# Altium schematic symbol library WR-TBL_Pluggable Connector.SchLib: 879 symbols (part 10 of 15)
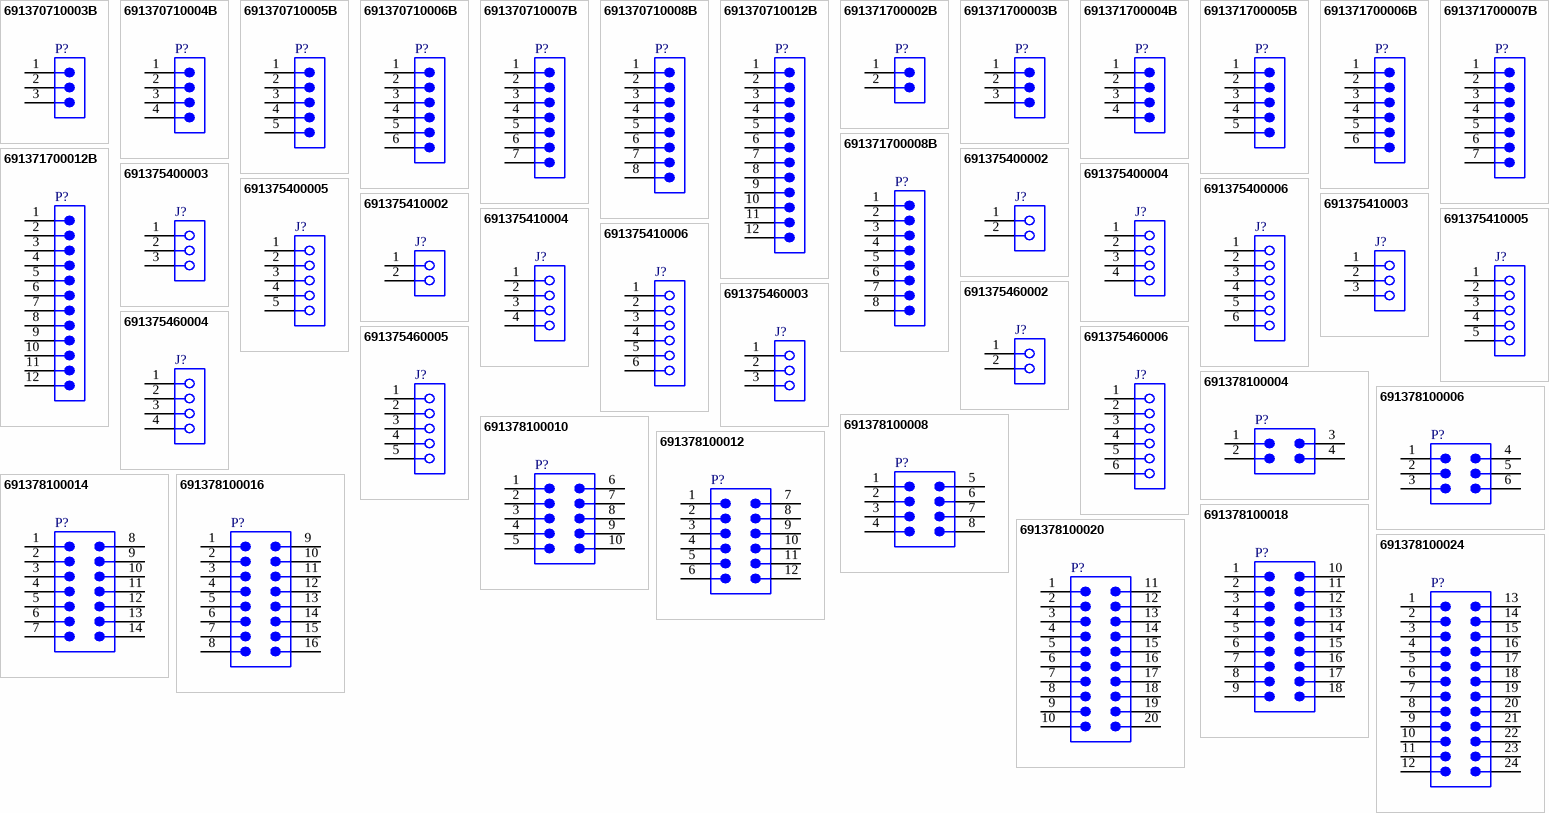
[diagram p30: symbols 691370710003B to 691378100024]

## 691371700007B
designator P?  (value not drawn)
WR-TBL Series 371B Vertical PCB Header, THT, pitch 5mm, 07p; Manufacturer: Wurth Elektronik; Modularity: No; Rated Current: 16A; Working Voltage: 300V (AC); Manufacturer Part Number: 691371700007B; Product Series: WR-TBL; ComponentLink1Description: Website Link; ComponentLink1URL: https://www.we-online.com; ComponentLink2Description: Datasheet Link; ComponentLink2URL: https://www.we-online.com/components/products/datasheet/691371700007B; Mount: Through Hole; Operating Temperature Min: -40degC; Operating Temperature Max: 105degC; Packaging: Box; Application: Pluggable; Number of Pins: 7; Number of Rows: 1; Orientation: Vertical; Lead Pitch: 5mm
footprint 691371700007B
pins: 1, 2, 3, 4, 5, 6, 7

## 691371700008B
designator P?  (value not drawn)
WR-TBL Series 371B Vertical PCB Header, THT, pitch 5mm, 08p; Manufacturer: Wurth Elektronik; Modularity: No; Rated Current: 16A; Working Voltage: 300V (AC); Manufacturer Part Number: 691371700008B; Product Series: WR-TBL; ComponentLink1Description: Website Link; ComponentLink1URL: https://www.we-online.com; ComponentLink2Description: Datasheet Link; ComponentLink2URL: https://www.we-online.com/components/products/datasheet/691371700008B; Mount: Through Hole; Operating Temperature Min: -40degC; Operating Temperature Max: 105degC; Packaging: Box; Application: Pluggable; Number of Pins: 8; Number of Rows: 1; Orientation: Vertical; Lead Pitch: 5mm
footprint 691371700008B
pins: 1, 2, 3, 4, 5, 6, 7, 8

## 691371700012B
designator P?  (value not drawn)
WR-TBL Series 371B Vertical PCB Header, THT, pitch 5mm, 12p; Manufacturer: Wurth Elektronik; Modularity: No; Rated Current: 16A; Working Voltage: 300V (AC); Manufacturer Part Number: 691371700012B; Product Series: WR-TBL; ComponentLink1Description: Website Link; ComponentLink1URL: https://www.we-online.com; ComponentLink2Description: Datasheet Link; ComponentLink2URL: https://www.we-online.com/components/products/datasheet/691371700012B; Mount: Through Hole; Operating Temperature Min: -40degC; Operating Temperature Max: 105degC; Packaging: Box; Application: Pluggable; Number of Pins: 12; Number of Rows: 1; Orientation: Vertical; Lead Pitch: 5mm
footprint 691371700012B
pins: 1, 2, 3, 4, 5, 6, 7, 8, 9, 10, 11, 12

## 691375400002
designator J?  (value not drawn)
WR-TBL Series 3754 PCB Header Vertical cable entry, THT, pitch 7.62mm, 02p; Manufacturer: Wurth Elektronik; Modularity: No; Manufacturer Part Number: 691375400002; Product Series: WR-TBL; ComponentLink1Description: Website Link; ComponentLink1URL: https://www.we-online.com; ComponentLink2Description: Datasheet Link; ComponentLink2URL: https://www.we-online.com/components/products/datasheet/691375400002; Mount: Through Hole; Operating Temperature Min: -30degC; Operating Temperature Max: 160degC; Packaging: Carton; Application: PCB Header; Number of Pins: 2; Number of Rows: 1; Orientation: Vertical Cable Entry; Lead Pitch: 7.62mm
footprint 691375400002
pins: 1, 2

## 691375400003
designator J?  (value not drawn)
WR-TBL Series 3754 PCB Header Vertical cable entry, THT, pitch 7.62mm, 03p; Manufacturer: Wurth Elektronik; Modularity: No; Manufacturer Part Number: 691375400003; Product Series: WR-TBL; ComponentLink1Description: Website Link; ComponentLink1URL: https://www.we-online.com; ComponentLink2Description: Datasheet Link; ComponentLink2URL: https://www.we-online.com/components/products/datasheet/691375400003; Mount: Through Hole; Operating Temperature Min: -30degC; Operating Temperature Max: 160degC; Packaging: Carton; Application: PCB Header; Number of Pins: 3; Number of Rows: 1; Orientation: Vertical Cable Entry; Lead Pitch: 7.62mm
footprint 691375400003
pins: 1, 2, 3

## 691375400004
designator J?  (value not drawn)
WR-TBL Series 3754 PCB Header Vertical cable entry, THT, pitch 7.62mm, 04p; Manufacturer: Wurth Elektronik; Modularity: No; Manufacturer Part Number: 691375400004; Product Series: WR-TBL; ComponentLink1Description: Website Link; ComponentLink1URL: https://www.we-online.com; ComponentLink2Description: Datasheet Link; ComponentLink2URL: https://www.we-online.com/components/products/datasheet/691375400004; Mount: Through Hole; Operating Temperature Min: -30degC; Operating Temperature Max: 160degC; Packaging: Carton; Application: PCB Header; Number of Pins: 4; Number of Rows: 1; Orientation: Vertical Cable Entry; Lead Pitch: 7.62mm
footprint 691375400004
pins: 1, 2, 3, 4

## 691375400005
designator J?  (value not drawn)
WR-TBL Series 3754 PCB Header Vertical cable entry, THT, pitch 7.62mm, 05p; Manufacturer: Wurth Elektronik; Modularity: No; Manufacturer Part Number: 691375400005; Product Series: WR-TBL; ComponentLink1Description: Website Link; ComponentLink1URL: https://www.we-online.com; ComponentLink2Description: Datasheet Link; ComponentLink2URL: https://www.we-online.com/components/products/datasheet/691375400005; Mount: Through Hole; Operating Temperature Min: -30degC; Operating Temperature Max: 160degC; Packaging: Carton; Application: PCB Header; Number of Pins: 5; Number of Rows: 1; Orientation: Vertical Cable Entry; Lead Pitch: 7.62mm
footprint 691375400005
pins: 1, 2, 3, 4, 5

## 691375400006
designator J?  (value not drawn)
WR-TBL Series 3754 PCB Header Vertical cable entry, THT, pitch 7.62mm, 06p; Manufacturer: Wurth Elektronik; Modularity: No; Manufacturer Part Number: 691375400006; Product Series: WR-TBL; ComponentLink1Description: Website Link; ComponentLink1URL: https://www.we-online.com; ComponentLink2Description: Datasheet Link; ComponentLink2URL: https://www.we-online.com/components/products/datasheet/691375400006; Mount: Through Hole; Operating Temperature Min: -30degC; Operating Temperature Max: 160degC; Packaging: Carton; Application: PCB Header; Number of Pins: 6; Number of Rows: 1; Orientation: Vertical Cable Entry; Lead Pitch: 7.62mm
footprint 691375400006
pins: 1, 2, 3, 4, 5, 6

## 691375410002
designator J?  (value not drawn)
WR-TBL Series 3754 PCB Header Horizontal cable entry, THT, pitch 7.62mm, 02p; Manufacturer: Wurth Elektronik; Modularity: No; Manufacturer Part Number: 691375410002; Product Series: WR-TBL; ComponentLink1Description: Website Link; ComponentLink1URL: https://www.we-online.com; ComponentLink2Description: Datasheet Link; ComponentLink2URL: https://www.we-online.com/components/products/datasheet/691375410002; Mount: Through Hole; Operating Temperature Min: -30degC; Operating Temperature Max: 160degC; Packaging: Carton; Application: PCB Header; Number of Pins: 2; Number of Rows: 1; Orientation: Horizontal Cable Entry; Lead Pitch: 7.62mm
footprint 691375410002
pins: 1, 2

## 691375410003
designator J?  (value not drawn)
WR-TBL Series 3754 PCB Header Horizontal cable entry, THT, pitch 7.62mm, 03p; Manufacturer: Wurth Elektronik; Modularity: No; Manufacturer Part Number: 691375410003; Product Series: WR-TBL; ComponentLink1Description: Website Link; ComponentLink1URL: https://www.we-online.com; ComponentLink2Description: Datasheet Link; ComponentLink2URL: https://www.we-online.com/components/products/datasheet/691375410003; Mount: Through Hole; Operating Temperature Min: -30degC; Operating Temperature Max: 160degC; Packaging: Carton; Application: PCB Header; Number of Pins: 3; Number of Rows: 1; Orientation: Horizontal Cable Entry; Lead Pitch: 7.62mm
footprint 691375410003
pins: 1, 2, 3

## 691375410004
designator J?  (value not drawn)
WR-TBL Series 3754 PCB Header Horizontal cable entry, THT, pitch 7.62mm, 04p; Manufacturer: Wurth Elektronik; Modularity: No; Manufacturer Part Number: 691375410004; Product Series: WR-TBL; ComponentLink1Description: Website Link; ComponentLink1URL: https://www.we-online.com; ComponentLink2Description: Datasheet Link; ComponentLink2URL: https://www.we-online.com/components/products/datasheet/691375410004; Mount: Through Hole; Operating Temperature Min: -30degC; Operating Temperature Max: 160degC; Packaging: Carton; Application: PCB Header; Number of Pins: 4; Number of Rows: 1; Orientation: Horizontal Cable Entry; Lead Pitch: 7.62mm
footprint 691375410004
pins: 1, 2, 3, 4

## 691375410005
designator J?  (value not drawn)
WR-TBL Series 3754 PCB Header Horizontal cable entry, THT, pitch 7.62mm, 05p; Manufacturer: Wurth Elektronik; Modularity: No; Manufacturer Part Number: 691375410005; Product Series: WR-TBL; ComponentLink1Description: Website Link; ComponentLink1URL: https://www.we-online.com; ComponentLink2Description: Datasheet Link; ComponentLink2URL: https://www.we-online.com/components/products/datasheet/691375410005; Mount: Through Hole; Operating Temperature Min: -30degC; Operating Temperature Max: 160degC; Packaging: Carton; Application: PCB Header; Number of Pins: 5; Number of Rows: 1; Orientation: Horizontal Cable Entry; Lead Pitch: 7.62mm
footprint 691375410005
pins: 1, 2, 3, 4, 5

## 691375410006
designator J?  (value not drawn)
WR-TBL Series 3754 PCB Header Horizontal cable entry, THT, pitch 7.62mm, 06p; Manufacturer: Wurth Elektronik; Modularity: No; Manufacturer Part Number: 691375410006; Product Series: WR-TBL; ComponentLink1Description: Website Link; ComponentLink1URL: https://www.we-online.com; ComponentLink2Description: Datasheet Link; ComponentLink2URL: https://www.we-online.com/components/products/datasheet/691375410006; Mount: Through Hole; Operating Temperature Min: -30degC; Operating Temperature Max: 160degC; Packaging: Carton; Application: PCB Header; Number of Pins: 6; Number of Rows: 1; Orientation: Horizontal Cable Entry; Lead Pitch: 7.62mm
footprint 691375410006
pins: 1, 2, 3, 4, 5, 6

## 691375460002
designator J?  (value not drawn)
WR-TBL Series 3754 PCB Header Upsidedown Horizontal cable entry, THT, pitch 7.62mm, 02p; Manufacturer: Wurth Elektronik; Modularity: No; Manufacturer Part Number: 691375460002; Product Series: WR-TBL; ComponentLink1Description: Website Link; ComponentLink1URL: https://www.we-online.com; ComponentLink2Description: Datasheet Link; ComponentLink2URL: https://www.we-online.com/components/products/datasheet/691375460002; Mount: Through Hole; Operating Temperature Min: -30degC; Operating Temperature Max: 160degC; Packaging: Carton; Application: PCB Header; Number of Pins: 2; Number of Rows: 1; Orientation: Horizontal Cable Entry; Lead Pitch: 7.62mm
footprint 691375460002
pins: 1, 2

## 691375460003
designator J?  (value not drawn)
WR-TBL Series 3754 PCB Header Upsidedown Horizontal cable entry, THT, pitch 7.62mm, 03p; Manufacturer: Wurth Elektronik; Modularity: No; Manufacturer Part Number: 691375460003; Product Series: WR-TBL; ComponentLink1Description: Website Link; ComponentLink1URL: https://www.we-online.com; ComponentLink2Description: Datasheet Link; ComponentLink2URL: https://www.we-online.com/components/products/datasheet/691375460003; Mount: Through Hole; Operating Temperature Min: -30degC; Operating Temperature Max: 160degC; Packaging: Carton; Application: PCB Header; Number of Pins: 3; Number of Rows: 1; Orientation: Horizontal Cable Entry; Lead Pitch: 7.62mm
footprint 691375460003
pins: 1, 2, 3

## 691375460004
designator J?  (value not drawn)
WR-TBL Series 3754 PCB Header Upsidedown Horizontal cable entry, THT, pitch 7.62mm, 04p; Manufacturer: Wurth Elektronik; Modularity: No; Manufacturer Part Number: 691375460004; Product Series: WR-TBL; ComponentLink1Description: Website Link; ComponentLink1URL: https://www.we-online.com; ComponentLink2Description: Datasheet Link; ComponentLink2URL: https://www.we-online.com/components/products/datasheet/691375460004; Mount: Through Hole; Operating Temperature Min: -30degC; Operating Temperature Max: 160degC; Packaging: Carton; Application: PCB Header; Number of Pins: 4; Number of Rows: 1; Orientation: Horizontal Cable Entry; Lead Pitch: 7.62mm
footprint 691375460004
pins: 1, 2, 3, 4

## 691375460005
designator J?  (value not drawn)
WR-TBL Series 3754 PCB Header Upsidedown Horizontal cable entry, THT, pitch 7.62mm, 05p; Manufacturer: Wurth Elektronik; Modularity: No; Manufacturer Part Number: 691375460005; Product Series: WR-TBL; ComponentLink1Description: Website Link; ComponentLink1URL: https://www.we-online.com; ComponentLink2Description: Datasheet Link; ComponentLink2URL: https://www.we-online.com/components/products/datasheet/691375460005; Mount: Through Hole; Operating Temperature Min: -30degC; Operating Temperature Max: 160degC; Packaging: Carton; Application: PCB Header; Number of Pins: 5; Number of Rows: 1; Orientation: Horizontal Cable Entry; Lead Pitch: 7.62mm
footprint 691375460005
pins: 1, 2, 3, 4, 5

## 691375460006
designator J?  (value not drawn)
WR-TBL Series 3754 PCB Header Upsidedown Horizontal cable entry, THT, pitch 7.62mm, 06p; Manufacturer: Wurth Elektronik; Modularity: No; Manufacturer Part Number: 691375460006; Product Series: WR-TBL; ComponentLink1Description: Website Link; ComponentLink1URL: https://www.we-online.com; ComponentLink2Description: Datasheet Link; ComponentLink2URL: https://www.we-online.com/components/products/datasheet/691375460006; Mount: Through Hole; Operating Temperature Min: -30degC; Operating Temperature Max: 160degC; Packaging: Carton; Application: PCB Header; Number of Pins: 6; Number of Rows: 1; Orientation: Horizontal Cable Entry; Lead Pitch: 7.62mm
footprint 691375460006
pins: 1, 2, 3, 4, 5, 6

## 691378100004
designator P?  (value not drawn)
WR-TBL Series 3781 PCB Header Dual Row Vertical, THT, pitch 3.5mm, 04p; Manufacturer: Wurth Elektronik; Insulator Material: PA66; Rated Current: 8A; Working Voltage: 300V (AC); Withstanding Voltage: 1600V (AC); Manufacturer Part Number: 691378100004; Product Series: WR-TBL; ComponentLink1Description: Website Link; ComponentLink1URL: https://www.we-online.com; ComponentLink2Description: Datasheet Link; ComponentLink2URL: https://www.we-online.com/components/products/datasheet/691378100004; Mount: Through Hole; Operating Temperature Min: -40degC; Operating Temperature Max: 115degC; Packaging: Carton; Application: Pluggable; Number of Pins: 4; Number of Rows: 2; Orientation: Vertical; Lead Pitch: 3.5mm
footprint 691378100004
pins: 1, 2, 3, 4

## 691378100006
designator P?  (value not drawn)
WR-TBL Series 3781 PCB Header Dual Row Vertical, THT, pitch 3.5mm, 06p; Manufacturer: Wurth Elektronik; Insulator Material: PA66; Rated Current: 8A; Working Voltage: 300V (AC); Withstanding Voltage: 1600V (AC); Manufacturer Part Number: 691378100006; Product Series: WR-TBL; ComponentLink1Description: Website Link; ComponentLink1URL: https://www.we-online.com; ComponentLink2Description: Datasheet Link; ComponentLink2URL: https://www.we-online.com/components/products/datasheet/691378100006; Mount: Through Hole; Operating Temperature Min: -40degC; Operating Temperature Max: 115degC; Packaging: Carton; Application: Pluggable; Number of Pins: 6; Number of Rows: 2; Orientation: Vertical; Lead Pitch: 3.5mm
footprint 691378100006
pins: 1, 2, 3, 4, 5, 6

## 691378100008
designator P?  (value not drawn)
WR-TBL Series 3781 PCB Header Dual Row Vertical, THT, pitch 3.5mm, 08p; Manufacturer: Wurth Elektronik; Insulator Material: PA66; Rated Current: 8A; Working Voltage: 300V (AC); Withstanding Voltage: 1600V (AC); Manufacturer Part Number: 691378100008; Product Series: WR-TBL; ComponentLink1Description: Website Link; ComponentLink1URL: https://www.we-online.com; ComponentLink2Description: Datasheet Link; ComponentLink2URL: https://www.we-online.com/components/products/datasheet/691378100008; Mount: Through Hole; Operating Temperature Min: -40degC; Operating Temperature Max: 115degC; Packaging: Carton; Application: Pluggable; Number of Pins: 8; Number of Rows: 2; Orientation: Vertical; Lead Pitch: 3.5mm
footprint 691378100008
pins: 1, 2, 3, 4, 5, 6, 7, 8

## 691378100010
designator P?  (value not drawn)
WR-TBL Series 3781 PCB Header Dual Row Vertical, THT, pitch 3.5mm, 10p; Manufacturer: Wurth Elektronik; Insulator Material: PA66; Rated Current: 8A; Working Voltage: 300V (AC); Withstanding Voltage: 1600V (AC); Manufacturer Part Number: 691378100010; Product Series: WR-TBL; ComponentLink1Description: Website Link; ComponentLink1URL: https://www.we-online.com; ComponentLink2Description: Datasheet Link; ComponentLink2URL: https://www.we-online.com/components/products/datasheet/691378100010; Mount: Through Hole; Operating Temperature Min: -40degC; Operating Temperature Max: 115degC; Packaging: Carton; Application: Pluggable; Number of Pins: 10; Number of Rows: 2; Orientation: Vertical; Lead Pitch: 3.5mm
footprint 691378100010
pins: 1, 2, 3, 4, 5, 6, 7, 8, 9, 10

## 691378100012
designator P?  (value not drawn)
WR-TBL Series 3781 PCB Header Dual Row Vertical, THT, pitch 3.5mm, 12p; Manufacturer: Wurth Elektronik; Insulator Material: PA66; Rated Current: 8A; Working Voltage: 300V (AC); Withstanding Voltage: 1600V (AC); Manufacturer Part Number: 691378100012; Product Series: WR-TBL; ComponentLink1Description: Website Link; ComponentLink1URL: https://www.we-online.com; ComponentLink2Description: Datasheet Link; ComponentLink2URL: https://www.we-online.com/components/products/datasheet/691378100012; Mount: Through Hole; Operating Temperature Min: -40degC; Operating Temperature Max: 115degC; Packaging: Carton; Application: Pluggable; Number of Pins: 12; Number of Rows: 2; Orientation: Vertical; Lead Pitch: 3.5mm
footprint 691378100012
pins: 1, 2, 3, 4, 5, 6, 7, 8, 9, 10, 11, 12

## 691378100014
designator P?  (value not drawn)
WR-TBL Series 3781 PCB Header Dual Row Vertical, THT, pitch 3.5mm, 14p; Manufacturer: Wurth Elektronik; Insulator Material: PA66; Rated Current: 8A; Working Voltage: 300V (AC); Withstanding Voltage: 1600V (AC); Manufacturer Part Number: 691378100014; Product Series: WR-TBL; ComponentLink1Description: Website Link; ComponentLink1URL: https://www.we-online.com; ComponentLink2Description: Datasheet Link; ComponentLink2URL: https://www.we-online.com/components/products/datasheet/691378100014; Mount: Through Hole; Operating Temperature Min: -40degC; Operating Temperature Max: 115degC; Packaging: Carton; Application: Pluggable; Number of Pins: 14; Number of Rows: 2; Orientation: Vertical; Lead Pitch: 3.5mm
footprint 691378100014
pins: 1, 2, 3, 4, 5, 6, 7, 8, 9, 10, 11, 12, 13, 14

## 691378100016
designator P?  (value not drawn)
WR-TBL Series 3781 PCB Header Dual Row Vertical, THT, pitch 3.5mm, 16p; Manufacturer: Wurth Elektronik; Insulator Material: PA66; Rated Current: 8A; Working Voltage: 300V (AC); Withstanding Voltage: 1600V (AC); Manufacturer Part Number: 691378100016; Product Series: WR-TBL; ComponentLink1Description: Website Link; ComponentLink1URL: https://www.we-online.com; ComponentLink2Description: Datasheet Link; ComponentLink2URL: https://www.we-online.com/components/products/datasheet/691378100016; Mount: Through Hole; Operating Temperature Min: -40degC; Operating Temperature Max: 115degC; Packaging: Carton; Application: Pluggable; Number of Pins: 16; Number of Rows: 2; Orientation: Vertical; Lead Pitch: 3.5mm
footprint 691378100016
pins: 1, 2, 3, 4, 5, 6, 7, 8, 9, 10, 11, 12, 13, 14, 15, 16

## 691378100018
designator P?  (value not drawn)
WR-TBL Series 3781 PCB Header Dual Row Vertical, THT, pitch 3.5mm, 18p; Manufacturer: Wurth Elektronik; Insulator Material: PA66; Rated Current: 8A; Working Voltage: 300V (AC); Withstanding Voltage: 1600V (AC); Manufacturer Part Number: 691378100018; Product Series: WR-TBL; ComponentLink1Description: Website Link; ComponentLink1URL: https://www.we-online.com; ComponentLink2Description: Datasheet Link; ComponentLink2URL: https://www.we-online.com/components/products/datasheet/691378100018; Mount: Through Hole; Operating Temperature Min: -40degC; Operating Temperature Max: 115degC; Packaging: Carton; Application: Pluggable; Number of Pins: 18; Number of Rows: 2; Orientation: Vertical; Lead Pitch: 3.5mm
footprint 691378100018
pins: 1, 2, 3, 4, 5, 6, 7, 8, 9, 10, 11, 12, 13, 14, 15, 16, 17, 18

## 691378100020
designator P?  (value not drawn)
WR-TBL Series 3781 PCB Header Dual Row Vertical, THT, pitch 3.5mm, 20p; Manufacturer: Wurth Elektronik; Insulator Material: PA66; Rated Current: 8A; Working Voltage: 300V (AC); Withstanding Voltage: 1600V (AC); Manufacturer Part Number: 691378100020; Product Series: WR-TBL; ComponentLink1Description: Website Link; ComponentLink1URL: https://www.we-online.com; ComponentLink2Description: Datasheet Link; ComponentLink2URL: https://www.we-online.com/components/products/datasheet/691378100020; Mount: Through Hole; Operating Temperature Min: -40degC; Operating Temperature Max: 115degC; Packaging: Carton; Application: Pluggable; Number of Pins: 20; Number of Rows: 2; Orientation: Vertical; Lead Pitch: 3.5mm
footprint 691378100020
pins: 1, 2, 3, 4, 5, 6, 7, 8, 9, 10, 11, 12, 13, 14, 15, 16, 17, 18, 19, 20

## 691378100024
designator P?  (value not drawn)
WR-TBL Series 3781 PCB Header Dual Row Vertical, THT, pitch 3.5mm, 24p; Manufacturer: Wurth Elektronik; Insulator Material: PA66; Rated Current: 8A; Working Voltage: 300V (AC); Withstanding Voltage: 1600V (AC); Manufacturer Part Number: 691378100024; Product Series: WR-TBL; ComponentLink1Description: Website Link; ComponentLink1URL: https://www.we-online.com; ComponentLink2Description: Datasheet Link; ComponentLink2URL: https://www.we-online.com/components/products/datasheet/691378100024; Mount: Through Hole; Operating Temperature Min: -40degC; Operating Temperature Max: 115degC; Packaging: Carton; Application: Pluggable; Number of Pins: 24; Number of Rows: 2; Orientation: Vertical; Lead Pitch: 3.5mm
footprint 691378100024
pins: 1, 2, 3, 4, 5, 6, 7, 8, 9, 10, 11, 12, 13, 14, 15, 16, 17, 18, 19, 20, 21, 22, 23, 24

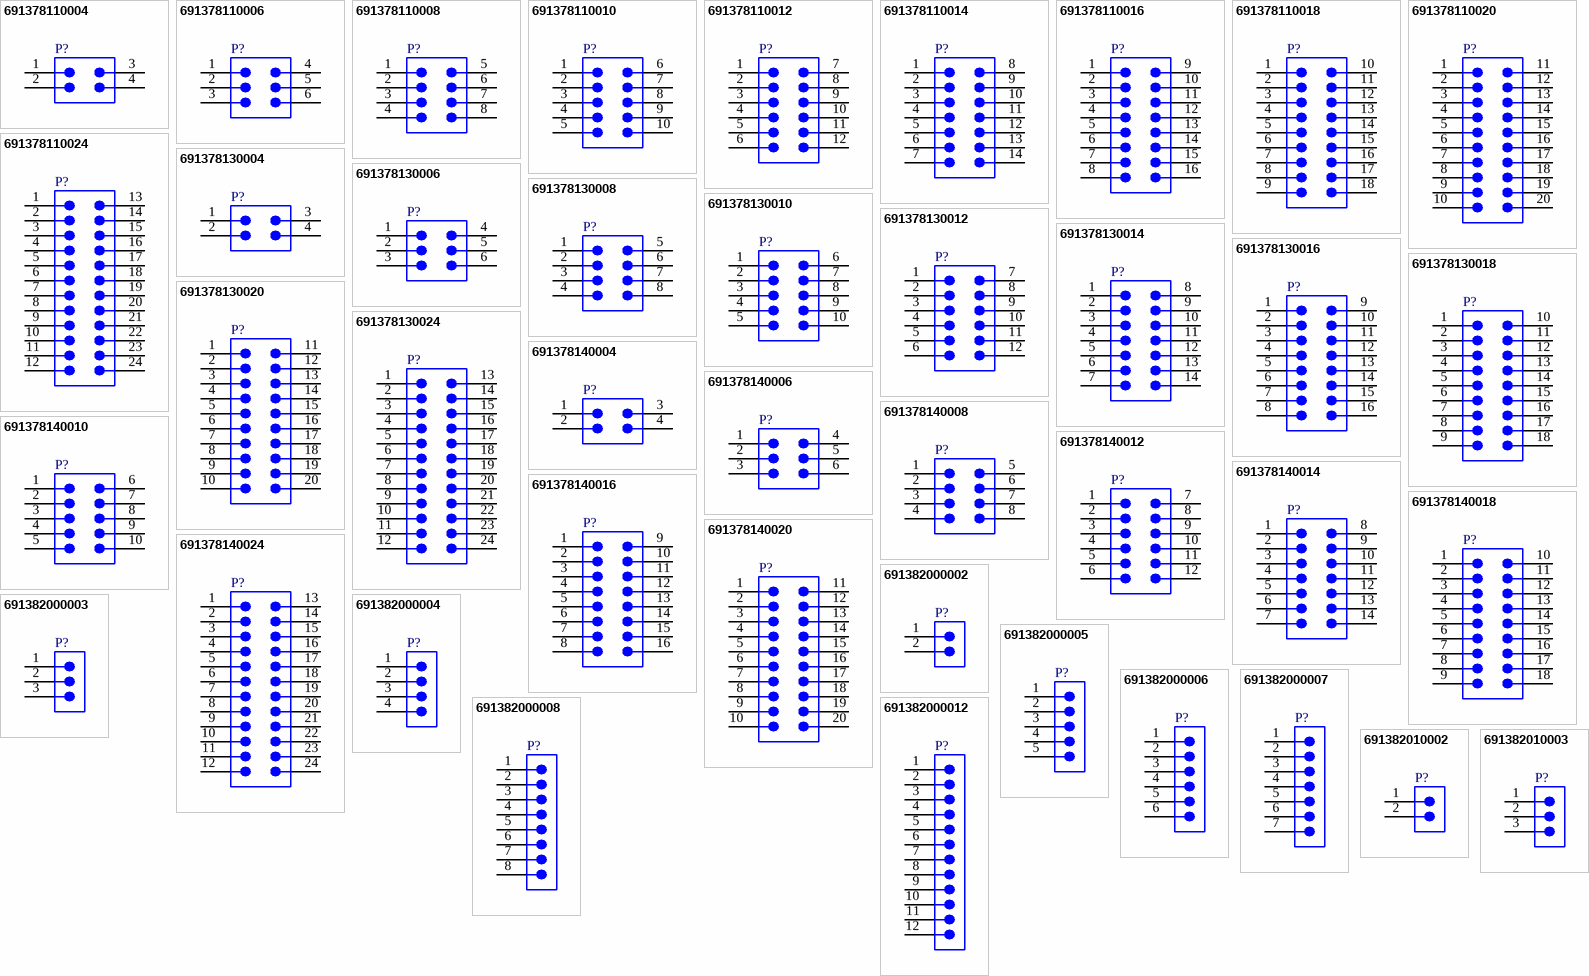
[diagram p15: symbols 691378110004 to 691382010003]

## 691378110004
designator P?  (value not drawn)
WR-TBL Series 3781 PCB Header Dual Row Horizontal, THT, pitch 3.5mm, 04p; Manufacturer: Wurth Elektronik; Insulator Material: PA66; Rated Current: 8A; Working Voltage: 150V (AC); Withstanding Voltage: 1300V (AC); Manufacturer Part Number: 691378110004; Product Series: WR-TBL; ComponentLink1Description: Website Link; ComponentLink1URL: https://www.we-online.com; ComponentLink2Description: Datasheet Link; ComponentLink2URL: https://www.we-online.com/components/products/datasheet/691378110004; Mount: Through Hole; Operating Temperature Min: -40degC; Operating Temperature Max: 115degC; Packaging: Carton; Application: Pluggable; Number of Pins: 4; Number of Rows: 2; Orientation: Horizontal; Lead Pitch: 3.5mm
footprint 691378110004
pins: 1, 2, 3, 4

## 691378110006
designator P?  (value not drawn)
WR-TBL Series 3781 PCB Header Dual Row Horizontal, THT, pitch 3.5mm, 06p; Manufacturer: Wurth Elektronik; Insulator Material: PA66; Rated Current: 8A; Working Voltage: 150V (AC); Withstanding Voltage: 1300V (AC); Manufacturer Part Number: 691378110006; Product Series: WR-TBL; ComponentLink1Description: Website Link; ComponentLink1URL: https://www.we-online.com; ComponentLink2Description: Datasheet Link; ComponentLink2URL: https://www.we-online.com/components/products/datasheet/691378110006; Mount: Through Hole; Operating Temperature Min: -40degC; Operating Temperature Max: 115degC; Packaging: Carton; Application: Pluggable; Number of Pins: 6; Number of Rows: 2; Orientation: Horizontal; Lead Pitch: 3.5mm
footprint 691378110006
pins: 1, 2, 3, 4, 5, 6

## 691378110008
designator P?  (value not drawn)
WR-TBL Series 3781 PCB Header Dual Row Horizontal, THT, pitch 3.5mm, 08p; Manufacturer: Wurth Elektronik; Insulator Material: PA66; Rated Current: 8A; Working Voltage: 150V (AC); Withstanding Voltage: 1300V (AC); Manufacturer Part Number: 691378110008; Product Series: WR-TBL; ComponentLink1Description: Website Link; ComponentLink1URL: https://www.we-online.com; ComponentLink2Description: Datasheet Link; ComponentLink2URL: https://www.we-online.com/components/products/datasheet/691378110008; Mount: Through Hole; Operating Temperature Min: -40degC; Operating Temperature Max: 115degC; Packaging: Carton; Application: Pluggable; Number of Pins: 8; Number of Rows: 2; Orientation: Horizontal; Lead Pitch: 3.5mm
footprint 691378110008
pins: 1, 2, 3, 4, 5, 6, 7, 8

## 691378110010
designator P?  (value not drawn)
WR-TBL Series 3781 PCB Header Dual Row Horizontal, THT, pitch 3.5mm, 10p; Manufacturer: Wurth Elektronik; Insulator Material: PA66; Rated Current: 8A; Working Voltage: 150V (AC); Withstanding Voltage: 1300V (AC); Manufacturer Part Number: 691378110010; Product Series: WR-TBL; ComponentLink1Description: Website Link; ComponentLink1URL: https://www.we-online.com; ComponentLink2Description: Datasheet Link; ComponentLink2URL: https://www.we-online.com/components/products/datasheet/691378110010; Mount: Through Hole; Operating Temperature Min: -40degC; Operating Temperature Max: 115degC; Packaging: Carton; Application: Pluggable; Number of Pins: 10; Number of Rows: 2; Orientation: Horizontal; Lead Pitch: 3.5mm
footprint 691378110010
pins: 1, 2, 3, 4, 5, 6, 7, 8, 9, 10

## 691378110012
designator P?  (value not drawn)
WR-TBL Series 3781 PCB Header Dual Row Horizontal, THT, pitch 3.5mm, 12p; Manufacturer: Wurth Elektronik; Insulator Material: PA66; Rated Current: 8A; Working Voltage: 150V (AC); Withstanding Voltage: 1300V (AC); Manufacturer Part Number: 691378110012; Product Series: WR-TBL; ComponentLink1Description: Website Link; ComponentLink1URL: https://www.we-online.com; ComponentLink2Description: Datasheet Link; ComponentLink2URL: https://www.we-online.com/components/products/datasheet/691378110012; Mount: Through Hole; Operating Temperature Min: -40degC; Operating Temperature Max: 115degC; Packaging: Carton; Application: Pluggable; Number of Pins: 12; Number of Rows: 2; Orientation: Horizontal; Lead Pitch: 3.5mm
footprint 691378110012
pins: 1, 2, 3, 4, 5, 6, 7, 8, 9, 10, 11, 12

## 691378110014
designator P?  (value not drawn)
WR-TBL Series 3781 PCB Header Dual Row Horizontal, THT, pitch 3.5mm, 14p; Manufacturer: Wurth Elektronik; Insulator Material: PA66; Rated Current: 8A; Working Voltage: 150V (AC); Withstanding Voltage: 1300V (AC); Manufacturer Part Number: 691378110014; Product Series: WR-TBL; ComponentLink1Description: Website Link; ComponentLink1URL: https://www.we-online.com; ComponentLink2Description: Datasheet Link; ComponentLink2URL: https://www.we-online.com/components/products/datasheet/691378110014; Mount: Through Hole; Operating Temperature Min: -40degC; Operating Temperature Max: 115degC; Packaging: Carton; Application: Pluggable; Number of Pins: 14; Number of Rows: 2; Orientation: Horizontal; Lead Pitch: 3.5mm
footprint 691378110014
pins: 1, 2, 3, 4, 5, 6, 7, 8, 9, 10, 11, 12, 13, 14

## 691378110016
designator P?  (value not drawn)
WR-TBL Series 3781 PCB Header Dual Row Horizontal, THT, pitch 3.5mm, 16p; Manufacturer: Wurth Elektronik; Insulator Material: PA66; Rated Current: 8A; Working Voltage: 150V (AC); Withstanding Voltage: 1300V (AC); Manufacturer Part Number: 691378110016; Product Series: WR-TBL; ComponentLink1Description: Website Link; ComponentLink1URL: https://www.we-online.com; ComponentLink2Description: Datasheet Link; ComponentLink2URL: https://www.we-online.com/components/products/datasheet/691378110016; Mount: Through Hole; Operating Temperature Min: -40degC; Operating Temperature Max: 115degC; Packaging: Carton; Application: Pluggable; Number of Pins: 16; Number of Rows: 2; Orientation: Horizontal; Lead Pitch: 3.5mm
footprint 691378110016
pins: 1, 2, 3, 4, 5, 6, 7, 8, 9, 10, 11, 12, 13, 14, 15, 16

## 691378110018
designator P?  (value not drawn)
WR-TBL Series 3781 PCB Header Dual Row Horizontal, THT, pitch 3.5mm, 18p; Manufacturer: Wurth Elektronik; Insulator Material: PA66; Rated Current: 8A; Working Voltage: 150V (AC); Withstanding Voltage: 1300V (AC); Manufacturer Part Number: 691378110018; Product Series: WR-TBL; ComponentLink1Description: Website Link; ComponentLink1URL: https://www.we-online.com; ComponentLink2Description: Datasheet Link; ComponentLink2URL: https://www.we-online.com/components/products/datasheet/691378110018; Mount: Through Hole; Operating Temperature Min: -40degC; Operating Temperature Max: 115degC; Packaging: Carton; Application: Pluggable; Number of Pins: 18; Number of Rows: 2; Orientation: Horizontal; Lead Pitch: 3.5mm
footprint 691378110018
pins: 1, 2, 3, 4, 5, 6, 7, 8, 9, 10, 11, 12, 13, 14, 15, 16, 17, 18

## 691378110020
designator P?  (value not drawn)
WR-TBL Series 3781 PCB Header Dual Row Horizontal, THT, pitch 3.5mm, 20p; Manufacturer: Wurth Elektronik; Insulator Material: PA66; Rated Current: 8A; Working Voltage: 150V (AC); Withstanding Voltage: 1300V (AC); Manufacturer Part Number: 691378110020; Product Series: WR-TBL; ComponentLink1Description: Website Link; ComponentLink1URL: https://www.we-online.com; ComponentLink2Description: Datasheet Link; ComponentLink2URL: https://www.we-online.com/components/products/datasheet/691378110020; Mount: Through Hole; Operating Temperature Min: -40degC; Operating Temperature Max: 115degC; Packaging: Carton; Application: Pluggable; Number of Pins: 20; Number of Rows: 2; Orientation: Horizontal; Lead Pitch: 3.5mm
footprint 691378110020
pins: 1, 2, 3, 4, 5, 6, 7, 8, 9, 10, 11, 12, 13, 14, 15, 16, 17, 18, 19, 20

## 691378110024
designator P?  (value not drawn)
WR-TBL Series 3781 PCB Header Dual Row Horizontal, THT, pitch 3.5mm, 24p; Manufacturer: Wurth Elektronik; Insulator Material: PA66; Rated Current: 8A; Working Voltage: 150V (AC); Withstanding Voltage: 1300V (AC); Manufacturer Part Number: 691378110024; Product Series: WR-TBL; ComponentLink1Description: Website Link; ComponentLink1URL: https://www.we-online.com; ComponentLink2Description: Datasheet Link; ComponentLink2URL: https://www.we-online.com/components/products/datasheet/691378110024; Mount: Through Hole; Operating Temperature Min: -40degC; Operating Temperature Max: 115degC; Packaging: Carton; Application: Pluggable; Number of Pins: 24; Number of Rows: 2; Orientation: Horizontal; Lead Pitch: 3.5mm
footprint 691378110024
pins: 1, 2, 3, 4, 5, 6, 7, 8, 9, 10, 11, 12, 13, 14, 15, 16, 17, 18, 19, 20, 21, 22, 23, 24

## 691378130004
designator P?  (value not drawn)
WR-TBL Series 3781 PCB Header Dual Row Vertical with flanges, THT, pitch 3.5mm, 04p; Manufacturer: Wurth Elektronik; Insulator Material: PA66; Rated Current: 8A; Working Voltage: 300V (AC); Withstanding Voltage: 1600V (AC); Manufacturer Part Number: 691378130004; Product Series: WR-TBL; ComponentLink1Description: Website Link; ComponentLink1URL: https://www.we-online.com; ComponentLink2Description: Datasheet Link; ComponentLink2URL: https://www.we-online.com/components/products/datasheet/691378130004; Mount: Through Hole; Operating Temperature Min: -40degC; Operating Temperature Max: 115degC; Packaging: Carton; Application: Pluggable; Number of Pins: 4; Number of Rows: 2; Orientation: Vertical; Lead Pitch: 3.5mm
footprint 691378130004
pins: 1, 2, 3, 4

## 691378130006
designator P?  (value not drawn)
WR-TBL Series 3781 PCB Header Dual Row Vertical with flanges, THT, pitch 3.5mm, 06p; Manufacturer: Wurth Elektronik; Insulator Material: PA66; Rated Current: 8A; Working Voltage: 300V (AC); Withstanding Voltage: 1600V (AC); Manufacturer Part Number: 691378130006; Product Series: WR-TBL; ComponentLink1Description: Website Link; ComponentLink1URL: https://www.we-online.com; ComponentLink2Description: Datasheet Link; ComponentLink2URL: https://www.we-online.com/components/products/datasheet/691378130006; Mount: Through Hole; Operating Temperature Min: -40degC; Operating Temperature Max: 115degC; Packaging: Carton; Application: Pluggable; Number of Pins: 6; Number of Rows: 2; Orientation: Vertical; Lead Pitch: 3.5mm
footprint 691378130006
pins: 1, 2, 3, 4, 5, 6

## 691378130008
designator P?  (value not drawn)
WR-TBL Series 3781 PCB Header Dual Row Vertical with flanges, THT, pitch 3.5mm, 08p; Manufacturer: Wurth Elektronik; Insulator Material: PA66; Rated Current: 8A; Working Voltage: 300V (AC); Withstanding Voltage: 1600V (AC); Manufacturer Part Number: 691378130008; Product Series: WR-TBL; ComponentLink1Description: Website Link; ComponentLink1URL: https://www.we-online.com; ComponentLink2Description: Datasheet Link; ComponentLink2URL: https://www.we-online.com/components/products/datasheet/691378130008; Mount: Through Hole; Operating Temperature Min: -40degC; Operating Temperature Max: 115degC; Packaging: Carton; Application: Pluggable; Number of Pins: 8; Number of Rows: 2; Orientation: Vertical; Lead Pitch: 3.5mm
footprint 691378130008
pins: 1, 2, 3, 4, 5, 6, 7, 8

## 691378130010
designator P?  (value not drawn)
WR-TBL Series 3781 PCB Header Dual Row Vertical with flanges, THT, pitch 3.5mm, 10p; Manufacturer: Wurth Elektronik; Insulator Material: PA66; Rated Current: 8A; Working Voltage: 300V (AC); Withstanding Voltage: 1600V (AC); Manufacturer Part Number: 691378130010; Product Series: WR-TBL; ComponentLink1Description: Website Link; ComponentLink1URL: https://www.we-online.com; ComponentLink2Description: Datasheet Link; ComponentLink2URL: https://www.we-online.com/components/products/datasheet/691378130010; Mount: Through Hole; Operating Temperature Min: -40degC; Operating Temperature Max: 115degC; Packaging: Carton; Application: Pluggable; Number of Pins: 10; Number of Rows: 2; Orientation: Vertical; Lead Pitch: 3.5mm
footprint 691378130010
pins: 1, 2, 3, 4, 5, 6, 7, 8, 9, 10

## 691378130012
designator P?  (value not drawn)
WR-TBL Series 3781 PCB Header Dual Row Vertical with flanges, THT, pitch 3.5mm, 12p; Manufacturer: Wurth Elektronik; Insulator Material: PA66; Rated Current: 8A; Working Voltage: 300V (AC); Withstanding Voltage: 1600V (AC); Manufacturer Part Number: 691378130012; Product Series: WR-TBL; ComponentLink1Description: Website Link; ComponentLink1URL: https://www.we-online.com; ComponentLink2Description: Datasheet Link; ComponentLink2URL: https://www.we-online.com/components/products/datasheet/691378130012; Mount: Through Hole; Operating Temperature Min: -40degC; Operating Temperature Max: 115degC; Packaging: Carton; Application: Pluggable; Number of Pins: 12; Number of Rows: 2; Orientation: Vertical; Lead Pitch: 3.5mm
footprint 691378130012
pins: 1, 2, 3, 4, 5, 6, 7, 8, 9, 10, 11, 12

## 691378130014
designator P?  (value not drawn)
WR-TBL Series 3781 PCB Header Dual Row Vertical with flanges, THT, pitch 3.5mm, 14p; Manufacturer: Wurth Elektronik; Insulator Material: PA66; Rated Current: 8A; Working Voltage: 300V (AC); Withstanding Voltage: 1600V (AC); Manufacturer Part Number: 691378130014; Product Series: WR-TBL; ComponentLink1Description: Website Link; ComponentLink1URL: https://www.we-online.com; ComponentLink2Description: Datasheet Link; ComponentLink2URL: https://www.we-online.com/components/products/datasheet/691378130014; Mount: Through Hole; Operating Temperature Min: -40degC; Operating Temperature Max: 115degC; Packaging: Carton; Application: Pluggable; Number of Pins: 14; Number of Rows: 2; Orientation: Vertical; Lead Pitch: 3.5mm
footprint 691378130014
pins: 1, 2, 3, 4, 5, 6, 7, 8, 9, 10, 11, 12, 13, 14

## 691378130016
designator P?  (value not drawn)
WR-TBL Series 3781 PCB Header Dual Row Vertical with flanges, THT, pitch 3.5mm, 16p; Manufacturer: Wurth Elektronik; Insulator Material: PA66; Rated Current: 8A; Working Voltage: 300V (AC); Withstanding Voltage: 1600V (AC); Manufacturer Part Number: 691378130016; Product Series: WR-TBL; ComponentLink1Description: Website Link; ComponentLink1URL: https://www.we-online.com; ComponentLink2Description: Datasheet Link; ComponentLink2URL: https://www.we-online.com/components/products/datasheet/691378130016; Mount: Through Hole; Operating Temperature Min: -40degC; Operating Temperature Max: 115degC; Packaging: Carton; Application: Pluggable; Number of Pins: 16; Number of Rows: 2; Orientation: Vertical; Lead Pitch: 3.5mm
footprint 691378130016
pins: 1, 2, 3, 4, 5, 6, 7, 8, 9, 10, 11, 12, 13, 14, 15, 16

## 691378130018
designator P?  (value not drawn)
WR-TBL Series 3781 PCB Header Dual Row Vertical with flanges, THT, pitch 3.5mm, 18p; Manufacturer: Wurth Elektronik; Insulator Material: PA66; Rated Current: 8A; Working Voltage: 300V (AC); Withstanding Voltage: 1600V (AC); Manufacturer Part Number: 691378130018; Product Series: WR-TBL; ComponentLink1Description: Website Link; ComponentLink1URL: https://www.we-online.com; ComponentLink2Description: Datasheet Link; ComponentLink2URL: https://www.we-online.com/components/products/datasheet/691378130018; Mount: Through Hole; Operating Temperature Min: -40degC; Operating Temperature Max: 115degC; Packaging: Carton; Application: Pluggable; Number of Pins: 18; Number of Rows: 2; Orientation: Vertical; Lead Pitch: 3.5mm
footprint 691378130018
pins: 1, 2, 3, 4, 5, 6, 7, 8, 9, 10, 11, 12, 13, 14, 15, 16, 17, 18

## 691378130020
designator P?  (value not drawn)
WR-TBL Series 3781 PCB Header Dual Row Vertical with flanges, THT, pitch 3.5mm, 20p; Manufacturer: Wurth Elektronik; Insulator Material: PA66; Rated Current: 8A; Working Voltage: 300V (AC); Withstanding Voltage: 1600V (AC); Manufacturer Part Number: 691378130020; Product Series: WR-TBL; ComponentLink1Description: Website Link; ComponentLink1URL: https://www.we-online.com; ComponentLink2Description: Datasheet Link; ComponentLink2URL: https://www.we-online.com/components/products/datasheet/691378130020; Mount: Through Hole; Operating Temperature Min: -40degC; Operating Temperature Max: 115degC; Packaging: Carton; Application: Pluggable; Number of Pins: 20; Number of Rows: 2; Orientation: Vertical; Lead Pitch: 3.5mm
footprint 691378130020
pins: 1, 2, 3, 4, 5, 6, 7, 8, 9, 10, 11, 12, 13, 14, 15, 16, 17, 18, 19, 20

## 691378130024
designator P?  (value not drawn)
WR-TBL Series 3781 PCB Header Dual Row Vertical with flanges, THT, pitch 3.5mm, 24p; Manufacturer: Wurth Elektronik; Insulator Material: PA66; Rated Current: 8A; Working Voltage: 300V (AC); Withstanding Voltage: 1600V (AC); Manufacturer Part Number: 691378130024; Product Series: WR-TBL; ComponentLink1Description: Website Link; ComponentLink1URL: https://www.we-online.com; ComponentLink2Description: Datasheet Link; ComponentLink2URL: https://www.we-online.com/components/products/datasheet/691378130024; Mount: Through Hole; Operating Temperature Min: -40degC; Operating Temperature Max: 115degC; Packaging: Carton; Application: Pluggable; Number of Pins: 24; Number of Rows: 2; Orientation: Vertical; Lead Pitch: 3.5mm
footprint 691378130024
pins: 1, 2, 3, 4, 5, 6, 7, 8, 9, 10, 11, 12, 13, 14, 15, 16, 17, 18, 19, 20, 21, 22, 23, 24

## 691378140004
designator P?  (value not drawn)
WR-TBL Series 3781 PCB Header Dual Row Horizontal with flanges, THT, pitch 3.5mm, 04p; Manufacturer: Wurth Elektronik; Insulator Material: PA66; Rated Current: 8A; Working Voltage: 150V (AC); Withstanding Voltage: 1300V (AC); Manufacturer Part Number: 691378140004; Product Series: WR-TBL; ComponentLink1Description: Website Link; ComponentLink1URL: https://www.we-online.com; ComponentLink2Description: Datasheet Link; ComponentLink2URL: https://www.we-online.com/components/products/datasheet/691378140004; Mount: Through Hole; Operating Temperature Min: -40degC; Operating Temperature Max: 115degC; Packaging: Carton; Application: Pluggable; Number of Pins: 4; Number of Rows: 2; Orientation: Horizontal; Lead Pitch: 3.5mm
footprint 691378140004
pins: 1, 2, 3, 4

## 691378140006
designator P?  (value not drawn)
WR-TBL Series 3781 PCB Header Dual Row Horizontal with flanges, THT, pitch 3.5mm, 06p; Manufacturer: Wurth Elektronik; Insulator Material: PA66; Rated Current: 8A; Working Voltage: 150V (AC); Withstanding Voltage: 1300V (AC); Manufacturer Part Number: 691378140006; Product Series: WR-TBL; ComponentLink1Description: Website Link; ComponentLink1URL: https://www.we-online.com; ComponentLink2Description: Datasheet Link; ComponentLink2URL: https://www.we-online.com/components/products/datasheet/691378140006; Mount: Through Hole; Operating Temperature Min: -40degC; Operating Temperature Max: 115degC; Packaging: Carton; Application: Pluggable; Number of Pins: 6; Number of Rows: 2; Orientation: Horizontal; Lead Pitch: 3.5mm
footprint 691378140006
pins: 1, 2, 3, 4, 5, 6

## 691378140008
designator P?  (value not drawn)
WR-TBL Series 3781 PCB Header Dual Row Horizontal with flanges, THT, pitch 3.5mm, 08p; Manufacturer: Wurth Elektronik; Insulator Material: PA66; Rated Current: 8A; Working Voltage: 150V (AC); Withstanding Voltage: 1300V (AC); Manufacturer Part Number: 691378140008; Product Series: WR-TBL; ComponentLink1Description: Website Link; ComponentLink1URL: https://www.we-online.com; ComponentLink2Description: Datasheet Link; ComponentLink2URL: https://www.we-online.com/components/products/datasheet/691378140008; Mount: Through Hole; Operating Temperature Min: -40degC; Operating Temperature Max: 115degC; Packaging: Carton; Application: Pluggable; Number of Pins: 8; Number of Rows: 2; Orientation: Horizontal; Lead Pitch: 3.5mm
footprint 691378140008
pins: 1, 2, 3, 4, 5, 6, 7, 8

## 691378140010
designator P?  (value not drawn)
WR-TBL Series 3781 PCB Header Dual Row Horizontal with flanges, THT, pitch 3.5mm, 10p; Manufacturer: Wurth Elektronik; Insulator Material: PA66; Rated Current: 8A; Working Voltage: 150V (AC); Withstanding Voltage: 1300V (AC); Manufacturer Part Number: 691378140010; Product Series: WR-TBL; ComponentLink1Description: Website Link; ComponentLink1URL: https://www.we-online.com; ComponentLink2Description: Datasheet Link; ComponentLink2URL: https://www.we-online.com/components/products/datasheet/691378140010; Mount: Through Hole; Operating Temperature Min: -40degC; Operating Temperature Max: 115degC; Packaging: Carton; Application: Pluggable; Number of Pins: 10; Number of Rows: 2; Orientation: Horizontal; Lead Pitch: 3.5mm
footprint 691378140010
pins: 1, 2, 3, 4, 5, 6, 7, 8, 9, 10

## 691378140012
designator P?  (value not drawn)
WR-TBL Series 3781 PCB Header Dual Row Horizontal with flanges, THT, pitch 3.5mm, 12p; Manufacturer: Wurth Elektronik; Insulator Material: PA66; Rated Current: 8A; Working Voltage: 150V (AC); Withstanding Voltage: 1300V (AC); Manufacturer Part Number: 691378140012; Product Series: WR-TBL; ComponentLink1Description: Website Link; ComponentLink1URL: https://www.we-online.com; ComponentLink2Description: Datasheet Link; ComponentLink2URL: https://www.we-online.com/components/products/datasheet/691378140012; Mount: Through Hole; Operating Temperature Min: -40degC; Operating Temperature Max: 115degC; Packaging: Carton; Application: Pluggable; Number of Pins: 12; Number of Rows: 2; Orientation: Horizontal; Lead Pitch: 3.5mm
footprint 691378140012
pins: 1, 2, 3, 4, 5, 6, 7, 8, 9, 10, 11, 12

## 691378140014
designator P?  (value not drawn)
WR-TBL Series 3781 PCB Header Dual Row Horizontal with flanges, THT, pitch 3.5mm, 14p; Manufacturer: Wurth Elektronik; Insulator Material: PA66; Rated Current: 8A; Working Voltage: 150V (AC); Withstanding Voltage: 1300V (AC); Manufacturer Part Number: 691378140014; Product Series: WR-TBL; ComponentLink1Description: Website Link; ComponentLink1URL: https://www.we-online.com; ComponentLink2Description: Datasheet Link; ComponentLink2URL: https://www.we-online.com/components/products/datasheet/691378140014; Mount: Through Hole; Operating Temperature Min: -40degC; Operating Temperature Max: 115degC; Packaging: Carton; Application: Pluggable; Number of Pins: 14; Number of Rows: 2; Orientation: Horizontal; Lead Pitch: 3.5mm
footprint 691378140014
pins: 1, 2, 3, 4, 5, 6, 7, 8, 9, 10, 11, 12, 13, 14

## 691378140016
designator P?  (value not drawn)
WR-TBL Series 3781 PCB Header Dual Row Horizontal with flanges, THT, pitch 3.5mm, 16p; Manufacturer: Wurth Elektronik; Insulator Material: PA66; Rated Current: 8A; Working Voltage: 150V (AC); Withstanding Voltage: 1300V (AC); Manufacturer Part Number: 691378140016; Product Series: WR-TBL; ComponentLink1Description: Website Link; ComponentLink1URL: https://www.we-online.com; ComponentLink2Description: Datasheet Link; ComponentLink2URL: https://www.we-online.com/components/products/datasheet/691378140016; Mount: Through Hole; Operating Temperature Min: -40degC; Operating Temperature Max: 115degC; Packaging: Carton; Application: Pluggable; Number of Pins: 16; Number of Rows: 2; Orientation: Horizontal; Lead Pitch: 3.5mm
footprint 691378140016
pins: 1, 2, 3, 4, 5, 6, 7, 8, 9, 10, 11, 12, 13, 14, 15, 16

## 691378140018
designator P?  (value not drawn)
WR-TBL Series 3781 PCB Header Dual Row Horizontal with flanges, THT, pitch 3.5mm, 18p; Manufacturer: Wurth Elektronik; Insulator Material: PA66; Rated Current: 8A; Working Voltage: 150V (AC); Withstanding Voltage: 1300V (AC); Manufacturer Part Number: 691378140018; Product Series: WR-TBL; ComponentLink1Description: Website Link; ComponentLink1URL: https://www.we-online.com; ComponentLink2Description: Datasheet Link; ComponentLink2URL: https://www.we-online.com/components/products/datasheet/691378140018; Mount: Through Hole; Operating Temperature Min: -40degC; Operating Temperature Max: 115degC; Packaging: Carton; Application: Pluggable; Number of Pins: 18; Number of Rows: 2; Orientation: Horizontal; Lead Pitch: 3.5mm
footprint 691378140018
pins: 1, 2, 3, 4, 5, 6, 7, 8, 9, 10, 11, 12, 13, 14, 15, 16, 17, 18

## 691378140020
designator P?  (value not drawn)
WR-TBL Series 3781 PCB Header Dual Row Horizontal with flanges, THT, pitch 3.5mm, 20p; Manufacturer: Wurth Elektronik; Insulator Material: PA66; Rated Current: 8A; Working Voltage: 150V (AC); Withstanding Voltage: 1300V (AC); Manufacturer Part Number: 691378140020; Product Series: WR-TBL; ComponentLink1Description: Website Link; ComponentLink1URL: https://www.we-online.com; ComponentLink2Description: Datasheet Link; ComponentLink2URL: https://www.we-online.com/components/products/datasheet/691378140020; Mount: Through Hole; Operating Temperature Min: -40degC; Operating Temperature Max: 115degC; Packaging: Carton; Application: Pluggable; Number of Pins: 20; Number of Rows: 2; Orientation: Horizontal; Lead Pitch: 3.5mm
footprint 691378140020
pins: 1, 2, 3, 4, 5, 6, 7, 8, 9, 10, 11, 12, 13, 14, 15, 16, 17, 18, 19, 20

## 691378140024
designator P?  (value not drawn)
WR-TBL Series 3781 PCB Header Dual Row Horizontal with flanges, THT, pitch 3.5mm, 24p; Manufacturer: Wurth Elektronik; Insulator Material: PA66; Rated Current: 8A; Working Voltage: 150V (AC); Withstanding Voltage: 1300V (AC); Manufacturer Part Number: 691378140024; Product Series: WR-TBL; ComponentLink1Description: Website Link; ComponentLink1URL: https://www.we-online.com; ComponentLink2Description: Datasheet Link; ComponentLink2URL: https://www.we-online.com/components/products/datasheet/691378140024; Mount: Through Hole; Operating Temperature Min: -40degC; Operating Temperature Max: 115degC; Packaging: Carton; Application: Pluggable; Number of Pins: 24; Number of Rows: 2; Orientation: Horizontal; Lead Pitch: 3.5mm
footprint 691378140024
pins: 1, 2, 3, 4, 5, 6, 7, 8, 9, 10, 11, 12, 13, 14, 15, 16, 17, 18, 19, 20, 21, 22, 23, 24

## 691382000002
designator P?  (value not drawn)
WR-TBL Series 382 Vertical PCB Header, THT, pitch 2.5mm, 02p; Manufacturer: Wurth Elektronik; Modularity: No; Rated Current: 12A; Working Voltage: 300V (AC); Manufacturer Part Number: 691382000002; Product Series: WR-TBL; ComponentLink1Description: Website Link; ComponentLink1URL: https://www.we-online.com; ComponentLink2Description: Datasheet Link; ComponentLink2URL: https://www.we-online.com/components/products/datasheet/691382000002; Mount: Through Hole; Operating Temperature Min: -40degC; Operating Temperature Max: 105degC; Packaging: Box; Application: Pluggable; Number of Pins: 2; Number of Rows: 1; Orientation: Vertical; Lead Pitch: 2.5mm
footprint 691382000002
pins: 1, 2

## 691382000003
designator P?  (value not drawn)
WR-TBL Series 382 Vertical PCB Header, THT, pitch 2.5mm, 03p; Manufacturer: Wurth Elektronik; Modularity: No; Rated Current: 12A; Working Voltage: 300V (AC); Manufacturer Part Number: 691382000003; Product Series: WR-TBL; ComponentLink1Description: Website Link; ComponentLink1URL: https://www.we-online.com; ComponentLink2Description: Datasheet Link; ComponentLink2URL: https://www.we-online.com/components/products/datasheet/691382000003; Mount: Through Hole; Operating Temperature Min: -40degC; Operating Temperature Max: 105degC; Packaging: Box; Application: Pluggable; Number of Pins: 3; Number of Rows: 1; Orientation: Vertical; Lead Pitch: 2.5mm
footprint 691382000003
pins: 1, 2, 3

## 691382000004
designator P?  (value not drawn)
WR-TBL Series 382 Vertical PCB Header, THT, pitch 2.5mm, 04p; Manufacturer: Wurth Elektronik; Modularity: No; Rated Current: 12A; Working Voltage: 300V (AC); Manufacturer Part Number: 691382000004; Product Series: WR-TBL; ComponentLink1Description: Website Link; ComponentLink1URL: https://www.we-online.com; ComponentLink2Description: Datasheet Link; ComponentLink2URL: https://www.we-online.com/components/products/datasheet/691382000004; Mount: Through Hole; Operating Temperature Min: -40degC; Operating Temperature Max: 105degC; Packaging: Box; Application: Pluggable; Number of Pins: 4; Number of Rows: 1; Orientation: Vertical; Lead Pitch: 2.5mm
footprint 691382000004
pins: 1, 2, 3, 4

## 691382000005
designator P?  (value not drawn)
WR-TBL Series 382 Vertical PCB Header, THT, pitch 2.5mm, 05p; Manufacturer: Wurth Elektronik; Modularity: No; Rated Current: 12A; Working Voltage: 300V (AC); Manufacturer Part Number: 691382000005; Product Series: WR-TBL; ComponentLink1Description: Website Link; ComponentLink1URL: https://www.we-online.com; ComponentLink2Description: Datasheet Link; ComponentLink2URL: https://www.we-online.com/components/products/datasheet/691382000005; Mount: Through Hole; Operating Temperature Min: -40degC; Operating Temperature Max: 105degC; Packaging: Box; Application: Pluggable; Number of Pins: 5; Number of Rows: 1; Orientation: Vertical; Lead Pitch: 2.5mm
footprint 691382000005
pins: 1, 2, 3, 4, 5